# Altium schematic symbol library BAT54C_215.SchLib: 1 symbol
Pins are listed as number, name and electrical type; pins without a type are passive.

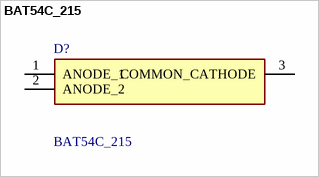
[diagram p0: symbol BAT54C_215]

## BAT54C_215
designator D?
Schottky barrier diode,BAT54C 0.2A 30V NXP BAT54C,215, Dual SMT Schottky Diode, Common Cathode, 30V 200mA, 5ns, 3-Pin TO-236AB; Manufacturer_Name: Nexperia; Geometry.Height: 1.1mm; Manufacturer_Part_Number: BAT54C,215; Mouser Part Number: 771-BAT54C-T/R; Mouser Price/Stock: https://www.mouser.co.uk/ProductDetail/Nexperia/BAT54C215?qs=me8TqzrmIYV5SKKt13YKQA%3D%3D; Arrow Part Number: BAT54C,215; Arrow Price/Stock: https://www.arrow.com/en/products/bat54c215/nexperia.html?utm_currency=USD&region=asia; Datasheet Link: https://assets.nexperia.com/documents/data-sheet/BAT54_SER.pdf
footprint BAT54C215
pins: 1 ANODE_1, 2 ANODE_2, 3 COMMON_CATHODE